# Altium footprint library bspd.PcbLib: 19 footprints (part 2 of 2)
Each footprint in its own frame and in the unit in brackets; x right, y up, seen from the top. Pads: shape width x height; smd on the part's side, far side on the other; paste and mask are expansions set on the pad; w line width, h text height; cw(c..) or ccw(c..) is an arc to the next point about the centre after c.
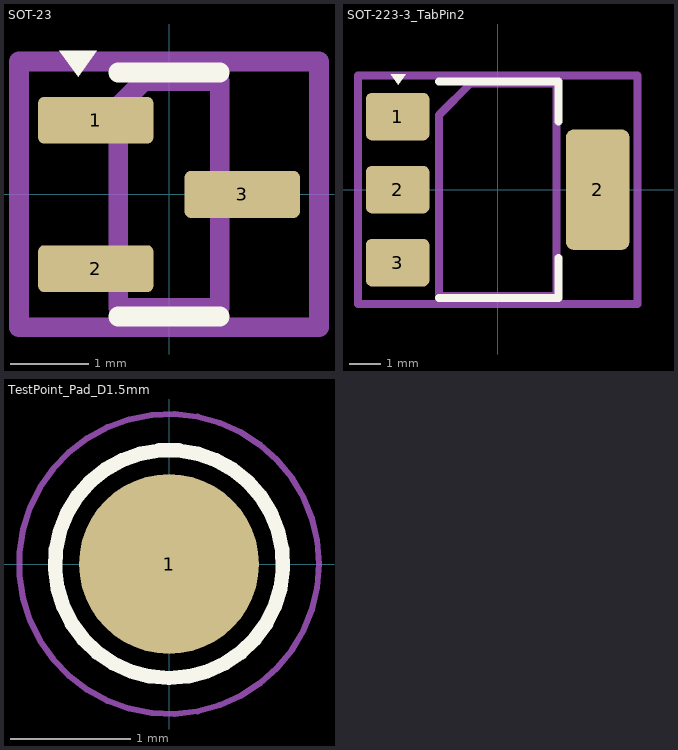
[diagram p1: the footprints below, top view; thin cyan lines are the x and y axes]

## SOT-23 [mm]
pads (3):
  rrect25% 1.475x0.6 smd: 1(-0.937,0.95) 2(-0.937,-0.95) 3(0.937,0)
F.SilkS:
  region: -1.162,1.51 -1.402,1.84 -0.923,1.84
  lines w0.254: -0.65,-1.56 0,-1.56 0.65,-1.56 ; -0.65,1.56 0,1.56 0.65,1.56
F.Fab:
  lines w0.254: -0.65,-1.45 0.65,-1.45 0.65,1.45 -0.325,1.45 -0.65,1.125 -0.65,-1.45
  text "'.Designator'" at -0.77,-0.132 h0.32
F.CrtYd:
  lines w0.254: -1.92,-1.7 -1.92,1.7 1.92,1.7 1.92,-1.7 -1.92,-1.7

## SOT-223-3_TabPin2 [mm]
pads (4):
  rrect25% 2x1.5 smd: 1(-3.15,2.3) 2(-3.15,0) 3(-3.15,-2.3)
  rrect25% 2x3.8 smd: 2(3.15,0)
F.SilkS:
  region: -3.13,3.31 -3.37,3.64 -2.89,3.64
  lines w0.254: -1.85,-3.41 1.91,-3.41 1.91,-2.15 ; -1.85,3.41 1.91,3.41 1.91,2.15
F.Fab:
  lines w0.254: -1.85,-3.35 -1.85,2.35 -0.85,3.35 1.85,3.35 1.85,-3.35 -1.85,-3.35
  text "'.Designator'" at 0.331,-1.932 h0.8
F.CrtYd:
  lines w0.254: -4.4,-3.6 -4.4,3.6 4.4,3.6 4.4,-3.6 -4.4,-3.6

## TestPoint_Pad_D1.5mm [mm]
pads (1):
  round 1.5 smd: 1(0,0)
F.SilkS:
  circle w0.12: c0,0 r0.95
F.Fab:
  text "'.Designator'" at -2.417,1.236 h1
F.CrtYd:
  circle w0.05: c0,0 r1.25